# Altium schematic symbol library SZMMSZ5234BT1G.SchLib: 1 symbol
Pins are listed as number, name and electrical type; pins without a type are passive.

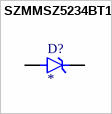
[diagram p0: symbol SZMMSZ5234BT1G]

## SZMMSZ5234BT1G
designator D?
Zener Diode 6.2 V 500 mW ±5% Surface Mount SOD-123; MF: {'manufacturer': u'onsemi'}; MP: SZMMSZ5234BT1G; Package: None; Price: None; Value: *; Availability: Unavailable
footprint DIO_SZMMSZ5234BT1G
pins: 1 K, 2 A